# Altium schematic symbol library LQW18AN6N5C8ZD.SchLib: 1 symbol
Pins are listed as number, name and electrical type; pins without a type are passive.

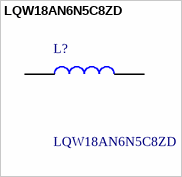
[diagram p0: symbol LQW18AN6N5C8ZD]

## LQW18AN6N5C8ZD
designator L?
LQW18AN_8Z Series Inductor 6.5nH +/-0.2nH 0603 (1608); Manufacturer_Name: Murata Electronics; Geometry.Height: 1mm; Mouser Part Number: 81-LQW18AN6N5C8ZD; Mouser Price/Stock: https://www.mouser.co.uk/ProductDetail/Murata-Electronics/LQW18AN6N5C8ZD?qs=qkDYIeTQ%252BEkCwtcGH3BvVg%3D%3D; Manufacturer_Part_Number: LQW18AN6N5C8ZD; Datasheet Link: https://search.murata.co.jp/Ceramy/image/img/P02/JELF243A-9133.pdf
footprint LQW18AN10NG80D
pins: 1, 2